# Altium footprint library PCB_IntegratedCircuit.PcbLib: 62 footprints (part 4 of 4)
Each footprint in its own frame and in the unit in brackets; x right, y up, seen from the top. Pads: shape width x height; smd on the part's side, far side on the other; paste and mask are expansions set on the pad; w line width, h text height; cw(c..) or ccw(c..) is an arc to the next point about the centre after c.
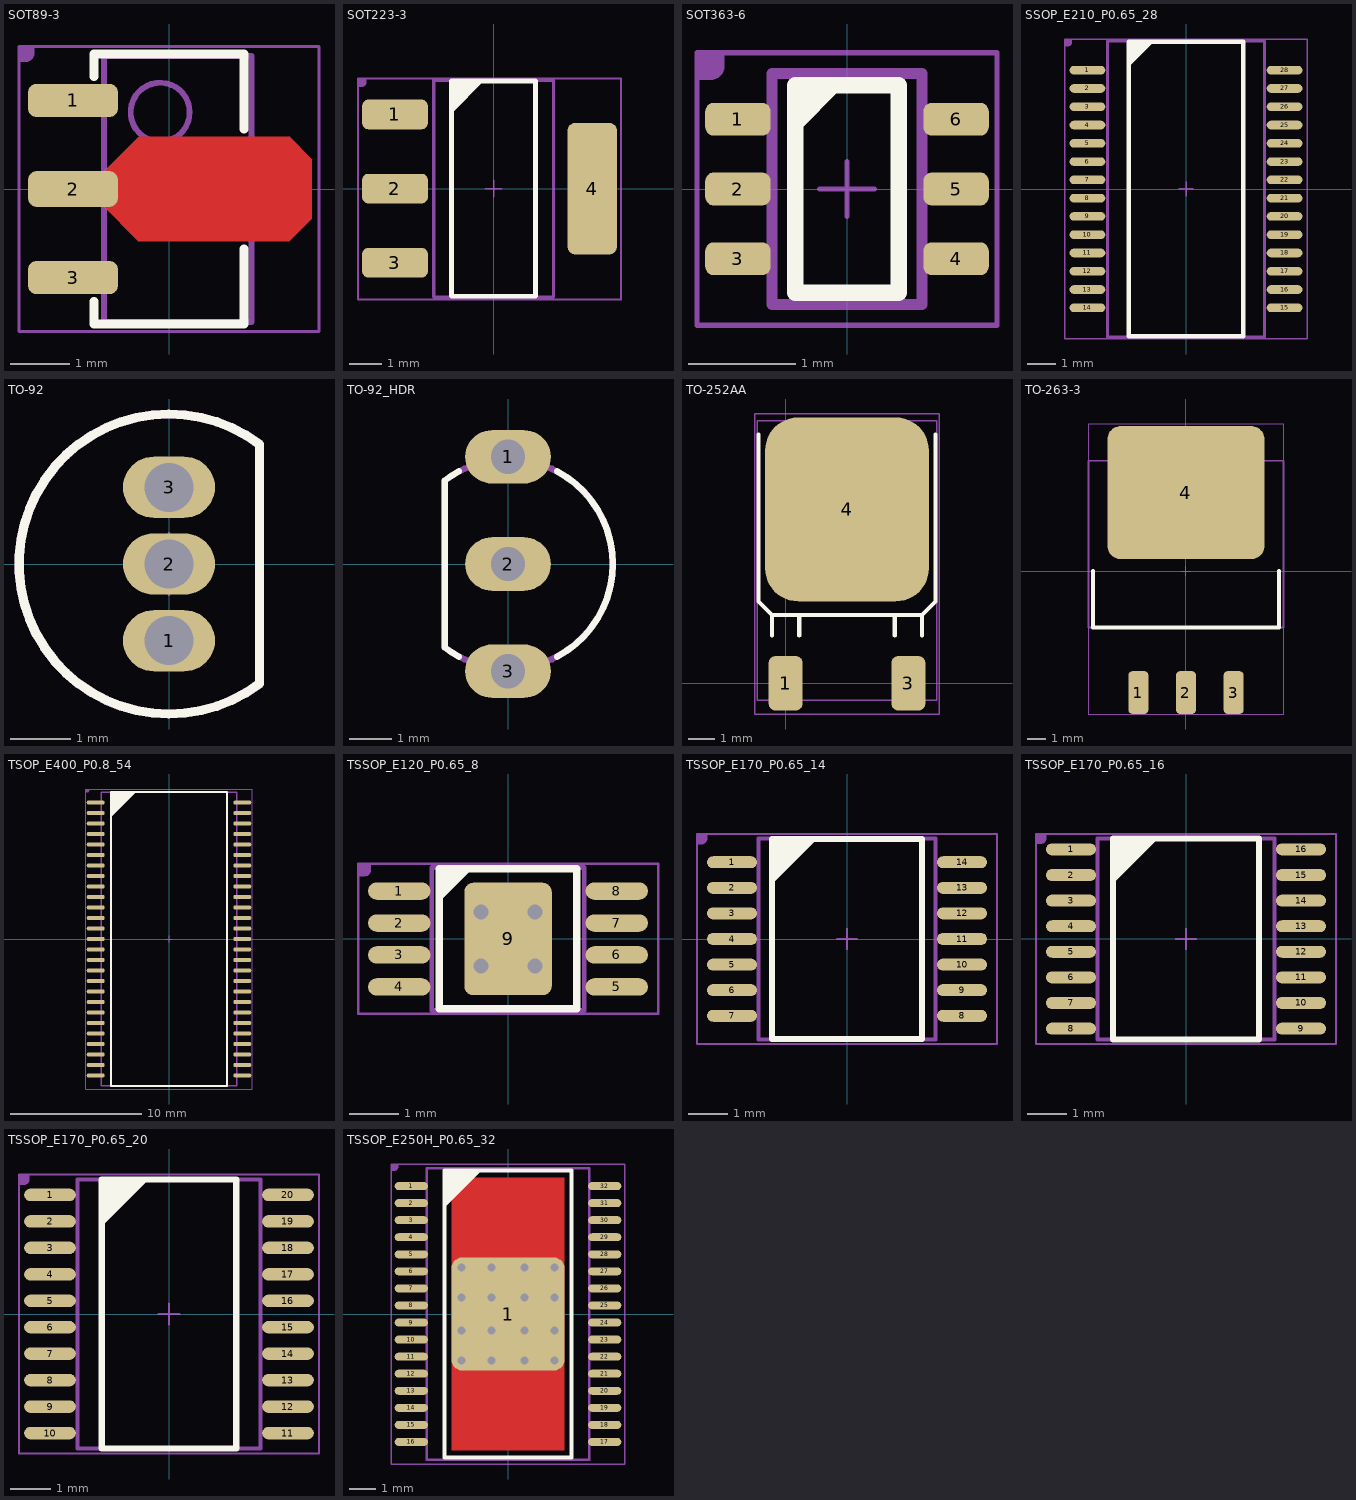
[diagram p3: the footprints below, top view; thin cyan lines are the x and y axes]

## SOT89-3 [mil]
height 59.06
pads (3):
  rrect50% 60x22 smd: 1(-64,59.06) 3(-64,-59.06)
  rrect50% 60x24 smd: 2(-64,0)
Top Layer:
  region: -45,10 -20,35 80,35 95,20 95,-20 80,-35 -20,-35 -45,-10
Top Overlay:
  lines w6: -50,-75 -50,-90 50,-90 50,-40 ; -50,75 -50,90 50,90 50,40
Mechanical 13:
  circle w3.94: c-5.91,51.18 r19.68
  lines w3.94: -13.78,0 25.59,0 ; 5.91,-19.69 5.91,19.68 ; -43.31,-88.58 -43.31,88.58 55.12,88.58 55.12,-88.58 -43.31,-88.58
T-Component:
  region: -100,95 -90,95 -90,90 -90,89.01 -90.76,87.17 -92.17,85.76 -94.01,85 -95,85 -100,85
  lines w2: -100,-95 -100,95 100,95 100,-95 -100,-95
  text ".Designator" at -41,-25 h100
3D body "SOT89-150P410X150-3N.step": height 60.06, standoff 1, extent -82.67,-88.44 74.81,88.45

## SOT223-3 [mil]
height 70.87
pads (4):
  rrect40% 80x36 smd: 1(-120,90.16) 2(-120,0) 3(-120,-90.16)
  rrect30% 60x160 smd: 4(120,0)
Top Overlay:
  region: -51.18,131 -11.81,131 -51.18,91.63
  lines w6: -51.18,-131 51.18,-131 51.18,131 -51.18,131 -51.18,-131
Mechanical 13:
  lines w2: -10,0 10,0 ; 0,-10 0,10
  lines w3.94: -72.83,-131.89 72.83,-131.89 72.83,131.89 -72.83,131.89 -72.83,-131.89
T-Component:
  region: -165,134 -155,134 -155,129 -155,128.01 -155.76,126.17 -157.17,124.76 -159.01,124 -160,124 -165,124
  lines w2: -165,-135 155,-135 155,134 -165,134 -165,-135
  text ".Designator" at -41,-25 h100
3D body "SOT223-4.STEP": height 70.87, standoff 0, extent -143.69,-131.9 143.71,131.88

## SOT363-6 [mil]
height 43.31
pads (6):
  rrect50% 24x12 smd: 1(-40,25.59) 2(-40,0) 3(-40,-25.59) 4(40,-25.59) 5(40,0) 6(40,25.59)
Top Overlay:
  region: -19,38 -5,38 -19,24
  lines w6: -19,24 -5,38 ; -19,-38 19,-38 19,38 -19,38 -19,-38
Mechanical 13:
  lines w2: -10,0 10,0 ; 0,-10 0,10
  lines w4: -27.56,-42.32 27.56,-42.32 27.56,42.32 -27.56,42.32 -27.56,-42.32
T-Component:
  region: -55,50 -45,50 -45,45 -45,44.01 -45.76,42.17 -47.17,40.76 -49.01,40 -50,40 -55,40
  lines w2: -55,-50 55,-50 55,50 -55,50 -55,-50
  text ".Designator" at -41,-25 h100
3D body "SW3dPS-SC70-6.STEP": height 36.73, standoff -0.67, extent -41.33,-39.37 41.35,39.37

## SSOP_E210_P0.65_28 [mil]
height 78.74
pads (28):
  oval 50x12 smd: 1(-138,166.34) 2(-138,140.75) 3(-138,115.16) 4(-138,89.57) 5(-138,63.98) 6(-138,38.39) 7(-138,12.8) 8(-138,-12.8) 9(-138,-38.39) 10(-138,-63.98) 11(-138,-89.57) 12(-138,-115.16) 13(-138,-140.75) 14(-138,-166.34) 15(138,-166.34) 16(138,-140.75) 17(138,-115.16) 18(138,-89.57) 19(138,-63.98) 20(138,-38.39) 21(138,-12.8) 22(138,12.8) 23(138,38.39) 24(138,63.98) 25(138,89.57) 26(138,115.16) 27(138,140.75) 28(138,166.34)
Top Overlay:
  region: -80,206 -45,206 -80,171
  lines w6: -80,-206 80,-206 80,206 -80,206 -80,-206
Mechanical 13:
  lines w2: -10,0 10,0 ; 0,-10 0,10
  lines w4: -110,-207 110,-207 110,207 -110,207 -110,-207
T-Component:
  region: -170,210 -160,210 -160,205 -160,204.01 -160.76,202.17 -162.17,200.76 -164.01,200 -165,200 -170,200
  lines w2: -170,-210 170,-210 170,210 -170,210 -170,-210
  text ".Designator" at -41,-25 h100
3D body "User Library-SSOP-28-1.STEP": height 84.65, standoff 0, extent -152.66,-203.34 152.68,203.35

## TO-92 [mil]
pads (3):
  oval 60x40 hole 32: 1(0,-50) 2(0,0) 3(0,50)
Top Overlay:
  lines w6: 59.06,-77.95 cw(c0,0) 59.06,77.95 59.05,-77.95
Mechanical 13:
  lines w2: -10,0 10,0 ; 0,-10 0,10
  lines w6: 59.06,-77.95 cw(c0,0) 59.06,77.95 59.05,-77.95
B-Component:
  lines w2: -20,0 20,0 ; 0,-20 0,20
3D body "SW3dPS-TO-92.STEP": height 405.76, standoff -228.35, extent -120,-124.1 69.37,120

## TO-92_HDR [mil]
pads (3):
  oval 80x50 hole 32: 1(0,100) 2(0,0) 3(0,-100)
Top Overlay:
  lines w6: -45.76,-86.43 cw(c0,0) -59.06,-77.95 -59.05,77.95 cw(c0,0) -45.76,86.43 ; 45.76,-86.43 ccw(c0,0) 45.76,86.43
Mechanical 13:
  lines w2: -10,0 10,0 ; 0,-10 0,10
  lines w6: -59.06,-77.95 ccw(c0,0) -59.06,77.95 -59.05,-77.95
B-Component:
  lines w2: -20,0 20,0 ; 0,-20 0,20
3D body "User Library-TO-92-4.STEP": height 409.84, standoff -300, extent -60.24,-112.28 104.72,113.7

## TO-252AA [mil]
pads (3):
  rrect40% 50x80 smd: 1(0,0) 3(180,0)
  rrect40% 240x270 smd: 4(90,255)
Top Overlay:
  lines w6: -40,365 -40,120 -20,100 ; -20,70 -20,100 ; 20,70 20,100 ; 160,70 160,100 ; 200,70 200,100 ; 220,365 220,120 200,100 ; -20,100 200,100
Mechanical 13:
  lines w2: -42,-25 -42,385 222,385 222,-25 -42,-25
T-Component:
  lines w2: -45,-45 225,-45 225,395 -45,395 -45,-45
3D body "TO-252.STEP": height 90.56, standoff -4.52, extent -38.73,-16.77 218.75,374.5

## TO-263-3 [mil]
height 182.68
pads (4):
  rrect40% 42x90 smd: 1(-100,-255) 2(0,-255) 3(100,-255)
  rrect20% 330x280 smd: 4(0,165)
Top Overlay:
  lines w8: -195,0 -195,-118.11 195,-118.11 195,0
Mechanical 13:
  lines w2: -10,0 10,0 ; 0,-10 0,10
  lines w4: -204.72,-118.11 204.72,-118.11 204.72,231.89 -204.72,231.89 -204.72,-118.11
T-Component:
  lines w2: -205,-300 205,-300 205,310 -205,310 -205,-300
  text ".Designator" at -41,-25 h100
3D body "SW3dPS-to-263.STEP": height 184.65, standoff 0, extent -199.99,-292.88 200.01,315

## TSOP_E400_P0.8_54 [mil]
height 47.24
pads (54):
  oval 54x12 smd: 1(-220,409.45) 2(-220,377.95) 3(-220,346.46) 4(-220,314.96) 5(-220,283.46) 6(-220,251.97) 7(-220,220.47) 8(-220,188.98) 9(-220,157.48) 10(-220,125.98) 11(-220,94.49) 12(-220,62.99) 13(-220,31.5) 14(-220,0) 15(-220,-31.5) 16(-220,-62.99) 17(-220,-94.49) 18(-220,-125.98) 19(-220,-157.48) 20(-220,-188.98) 21(-220,-220.47) 22(-220,-251.97) 23(-220,-283.47) 24(-220,-314.96) 25(-220,-346.46) 26(-220,-377.95) 27(-220,-409.45) 28(220,-409.45) 29(220,-377.95) 30(220,-346.46) 31(220,-314.96) 32(220,-283.47) 33(220,-251.97) 34(220,-220.47) 35(220,-188.98) 36(220,-157.48) 37(220,-125.98) 38(220,-94.49) 39(220,-62.99) 40(220,-31.5) 41(220,0) 42(220,31.5) 43(220,62.99) 44(220,94.49) 45(220,125.98) 46(220,157.48) 47(220,188.98) 48(220,220.47) 49(220,251.97) 50(220,283.46) 51(220,314.96) 52(220,346.46) 53(220,377.95) 54(220,409.45)
Top Overlay:
  region: -174.21,440.94 -99.06,440.94 -174.21,365.79
  lines w6: -174.21,-440.94 174.21,-440.94 174.21,440.94 -174.21,440.94 -174.21,-440.94
Mechanical 13:
  lines w2: -10,0 10,0 ; 0,-10 0,10
  lines w4: -202.76,-440.94 202.76,-440.94 202.76,440.94 -202.76,440.94 -202.76,-440.94
T-Component:
  region: -250,450 -240,450 -240,445 -240,444.01 -240.76,442.17 -242.17,440.76 -244.01,440 -245,440 -250,440
  lines w2: -250,-450 -250,450 250,450 250,-450 -250,-450
  text ".Designator" at -41,-25 h100
3D body "SW3dPS-TSOP2-54.STEP": height 51, standoff -15.9, extent -231.5,-437.8 231.5,437

## TSSOP_E120_P0.65_8 [mil]
height 43.31
pads (9):
  oval 50x14 smd: 1(-87,38.39) 2(-87,12.8) 3(-87,-12.8) 4(-87,-38.39) 5(87,-38.39) 6(87,-12.8) 7(87,12.8) 8(87,38.39)
  rrect20% 70x90 smd: 9(0,0)
via -21.65,21.65 diameter 20 hole 12
via 21.65,21.65 diameter 20 hole 12
via -21.65,-21.65 diameter 20 hole 12
via 21.65,-21.65 diameter 20 hole 12
Top Overlay:
  region: -55,56 -29,56 -55,30
  lines w6: -55,-56 -55,56 55,56 55,-56 -55,-56
Mechanical 13:
  lines w2: -10,0 10,0 ; 0,-10 0,10
  lines w3.94: -61.02,-57.09 -61.02,57.09 61.02,57.09 61.02,-57.09 -61.02,-57.09
T-Component:
  region: -120,60 -110,60 -110,55 -110,54.01 -110.76,52.17 -112.17,50.76 -114.01,50 -115,50 -120,50
  lines w2: -120,-60 120,-60 120,60 -120,60 -120,-60
  text ".Designator" at -41,-25 h100
3D body "TSOP65P490X110_HS-9L.step": height 43.31, standoff 0, extent -96.06,-57.09 96.06,57.09

## TSSOP_E170_P0.65_14 [mil]
height 47.24
pads (14):
  oval 50x12 smd: 1(-115,76.77) 2(-115,51.18) 3(-115,25.59) 4(-115,0) 5(-115,-25.59) 6(-115,-51.18) 7(-115,-76.77) 8(115,-76.77) 9(115,-51.18) 10(115,-25.59) 11(115,0) 12(115,25.59) 13(115,51.18) 14(115,76.77)
Top Overlay:
  region: -75,100.47 -30,100.47 -75,55.47
  lines w6: -75,-100 75,-100 75,100 -75,100 -75,-100
Mechanical 13:
  lines w2: -10,0 10,0 ; 0,-10 0,10
  lines w3.94: -88.58,-100.39 88.58,-100.39 88.58,100.39 -88.58,100.39 -88.58,-100.39
T-Component:
  region: -150,105 -140,105 -140,100 -140,99.01 -140.76,97.17 -142.17,95.76 -144.01,95 -145,95 -150,95
  lines w2: -150,-105 -150,105 150,105 150,-105 -150,-105
  text ".Designator" at -41,-25 h100
3D body "User Library-tssop14-2.STEP": height 47.24, standoff 0, extent -125.98,-100.39 125.99,100.4

## TSSOP_E170_P0.65_16 [mil]
height 47.24
pads (16):
  oval 50x12 smd: 1(-115,89.57) 2(-115,63.98) 3(-115,38.39) 4(-115,12.8) 5(-115,-12.8) 6(-115,-38.39) 7(-115,-63.98) 8(-115,-89.57) 9(115,-89.57) 10(115,-63.98) 11(115,-38.39) 12(115,-12.8) 13(115,12.8) 14(115,38.39) 15(115,63.98) 16(115,89.57)
Top Overlay:
  region: -72.83,100.87 -27.83,100.87 -72.83,55.87
  lines w6: -72.83,-100.39 72.83,-100.39 72.83,100.39 -72.83,100.39 -72.83,-100.39
Mechanical 13:
  lines w2: -10,0 10,0 ; 0,-10 0,10
  lines w3.94: -88.58,-100.39 88.58,-100.39 88.58,100.39 -88.58,100.39 -88.58,-100.39
T-Component:
  region: -150,105 -140,105 -140,100 -140,99.01 -140.76,97.17 -142.17,95.76 -144.01,95 -145,95 -150,95
  lines w2: -150,-105 150,-105 150,105 -150,105 -150,-105
  text ".Designator" at -41,-25 h100
3D body "User Library-tssop16-2.STEP": height 47.24, standoff 0, extent -125.98,-100.39 125.99,100.4

## TSSOP_E170_P0.65_20 [mil]
height 47.24
pads (20):
  oval 50x12 smd: 1(-115,115.16) 2(-115,89.57) 3(-115,63.98) 4(-115,38.39) 5(-115,12.8) 6(-115,-12.8) 7(-115,-38.39) 8(-115,-63.98) 9(-115,-89.57) 10(-115,-115.16) 11(115,-115.16) 12(115,-89.57) 13(115,-63.98) 14(115,-38.39) 15(115,-12.8) 16(115,12.8) 17(115,38.39) 18(115,63.98) 19(115,89.57) 20(115,115.16)
Top Overlay:
  region: -65,130 -20,130 -65,85
  lines w6: -65,-130 -65,130 65,130 65,-130 -65,-130
Mechanical 13:
  lines w2: -10,0 10,0 ; 0,-10 0,10
  lines w3.94: -88.58,-129.92 -88.58,129.92 88.58,129.92 88.58,-129.92 -88.58,-129.92
T-Component:
  region: -145,135 -135,135 -135,130 -135,129.01 -135.76,127.17 -137.17,125.76 -139.01,125 -140,125 -145,125
  lines w2: -145,-135 145,-135 145,135 -145,135 -145,-135
  text ".Designator" at -41,-25 h100
3D body "User Library-TSSOP-20 6_6x4_4.STEP": height 41.69, standoff -1.62, extent -125.98,-129.91 125.99,129.93

## TSSOP_E250H_P0.65_32 [mil]
height 47.24
pads (33):
  oval 50x12 smd: 1(-145,191.93) 2(-145,166.34) 3(-145,140.75) 4(-145,115.16) 5(-145,89.57) 6(-145,63.98) 7(-145,38.39) 8(-145,12.8) 9(-145,-12.8) 10(-145,-38.39) 11(-145,-63.98) 12(-145,-89.57) 13(-145,-115.16) 14(-145,-140.75) 15(-145,-166.34) 16(-145,-191.93) 17(145,-191.93) 18(145,-166.34) 19(145,-140.75) 20(145,-115.16) 21(145,-89.57) 22(145,-63.98) 23(145,-38.39) 24(145,-12.8) 25(145,12.8) 26(145,38.39) 27(145,63.98) 28(145,89.57) 29(145,115.16) 30(145,140.75) 31(145,166.34) 32(145,191.93)
  rrect20% 170x170 smd: 1(0,0)
via -70,-70 diameter 24 hole 12
via 70,-70 diameter 24 hole 12
via -25,-70 diameter 24 hole 12
via 25,-70 diameter 24 hole 12
via 25,-25 diameter 24 hole 12
via -25,-25 diameter 24 hole 12
via 70,-25 diameter 24 hole 12
via -70,-25 diameter 24 hole 12
via 70,25 diameter 24 hole 12
via -70,25 diameter 24 hole 12
via 25,25 diameter 24 hole 12
via -25,25 diameter 24 hole 12
via -25,70 diameter 24 hole 12
via 25,70 diameter 24 hole 12
via -70,70 diameter 24 hole 12
via 70,70 diameter 24 hole 12
Top Layer:
  rectangle: -85,-205 85,205
Top Overlay:
  region: -95,215 -40,215 -95,160
  lines w6: -95,-215 95,-215 95,215 -95,215 -95,-215
Mechanical 13:
  lines w2: -10,0 10,0 ; 0,-10 0,10
  lines w3.94: -122.05,-218.5 122.05,-218.5 122.05,218.5 -122.05,218.5 -122.05,-218.5
T-Component:
  region: -175,225 -165,225 -165,220 -165,219.01 -165.76,217.17 -167.17,215.76 -169.01,215 -170,215 -175,215
  lines w2: -175,-225 175,-225 175,225 -175,225 -175,-225
  text ".Designator" at -41,-25 h100
3D body "SW3dPS-SSOP30-P065.STEP": height 43.26, standoff -1.57, extent -157.48,-180.79 157.48,207